# Altium schematic symbol library CC0603KRX7R9BB103.SchLib: 1 symbol
Pins are listed as number, name and electrical type; pins without a type are passive.

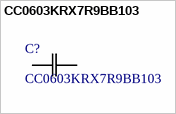
[diagram p0: symbol CC0603KRX7R9BB103]

## CC0603KRX7R9BB103
designator C?
Description; Manufacturer_Name: Yageo; Copyright: Copyright (C) 2025 Ultra Librarian. All rights reserved.; Manufacturer_Part_Number: CC0603KRX7R9BB103
footprint CC0603N_YAG
pins: 1, 2